# Altium footprint library LM311P.PcbLib: 1 footprints
Each footprint in its own frame and in the unit in brackets; x right, y up, seen from the top. Pads: shape width x height; smd on the part's side, far side on the other; paste and mask are expansions set on the pad; w line width, h text height; cw(c..) or ccw(c..) is an arc to the next point about the centre after c.
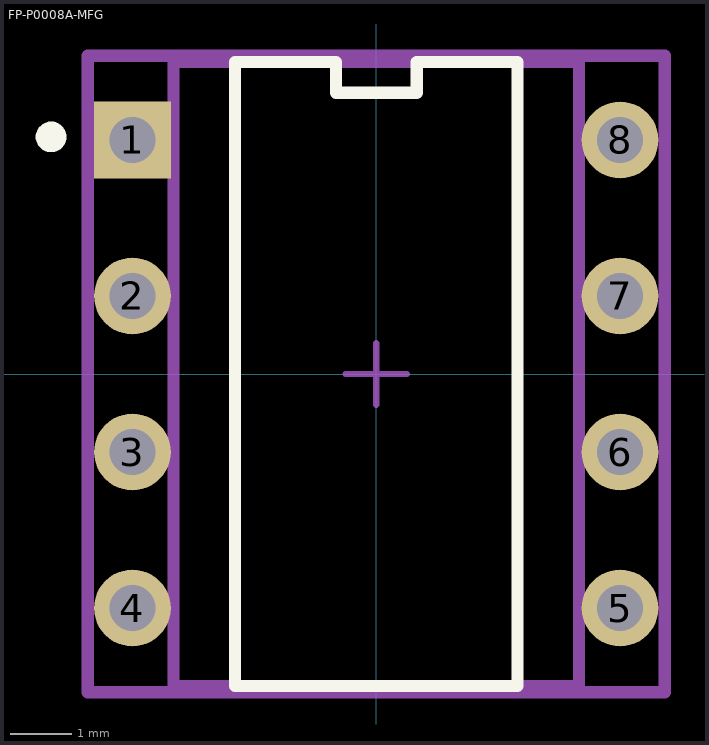
[diagram p0: the footprint, top view; thin cyan lines are the x and y axes]

## FP-P0008A-MFG [mm]
pads (8):
  rect 1.25x1.25 hole 0.75 paste-2539.97 mask+0: 1(-3.97,3.81)
  round 1.25 hole 0.75 paste-2539.97 mask+0: 2(-3.97,1.27) 3(-3.97,-1.27) 4(-3.97,-3.81) 5(3.97,-3.81) 6(3.97,-1.27) 7(3.97,1.27) 8(3.97,3.81)
Top Overlay:
  circle w0.25: c-5.295,3.86 r0.125
  lines w0.2: -2.3,-5.08 2.3,-5.08 2.3,5.08 0.657,5.08 0.657,4.58 -0.657,4.58 -0.657,5.08 -2.3,5.08 -2.3,-5.08
Top Assembly:
  lines w0.2: -4.695,-5.18 -4.695,5.18 4.695,5.18 4.695,-5.18 -4.695,-5.18
  text ".Designator" at 0,0.187 h1
Top 3D Body:
  lines w0.2: -3.3,-5.08 -3.3,5.08 3.3,5.08 3.3,-5.08 -3.3,-5.08
Top Courtyard:
  lines w0.2: -4.695,-5.18 -4.695,5.18 4.695,5.18 4.695,-5.18 -4.695,-5.18
Top Component Center:
  lines w0.1: -0.5,0 0.5,0 ; 0,-0.5 0,0.5
3D body "IC_Texas_Instruments_LM311P_eec.STEP": height 0.25, standoff 0, extent -4.695,-5.18 4.695,5.18